# Altium footprint library NFC_Luggage_Tag.PcbLib: 17 footprints (part 1 of 2)
Each footprint in its own frame and in the unit in brackets; x right, y up, seen from the top. Pads: shape width x height; smd on the part's side, far side on the other; paste and mask are expansions set on the pad; w line width, h text height; cw(c..) or ccw(c..) is an arc to the next point about the centre after c.
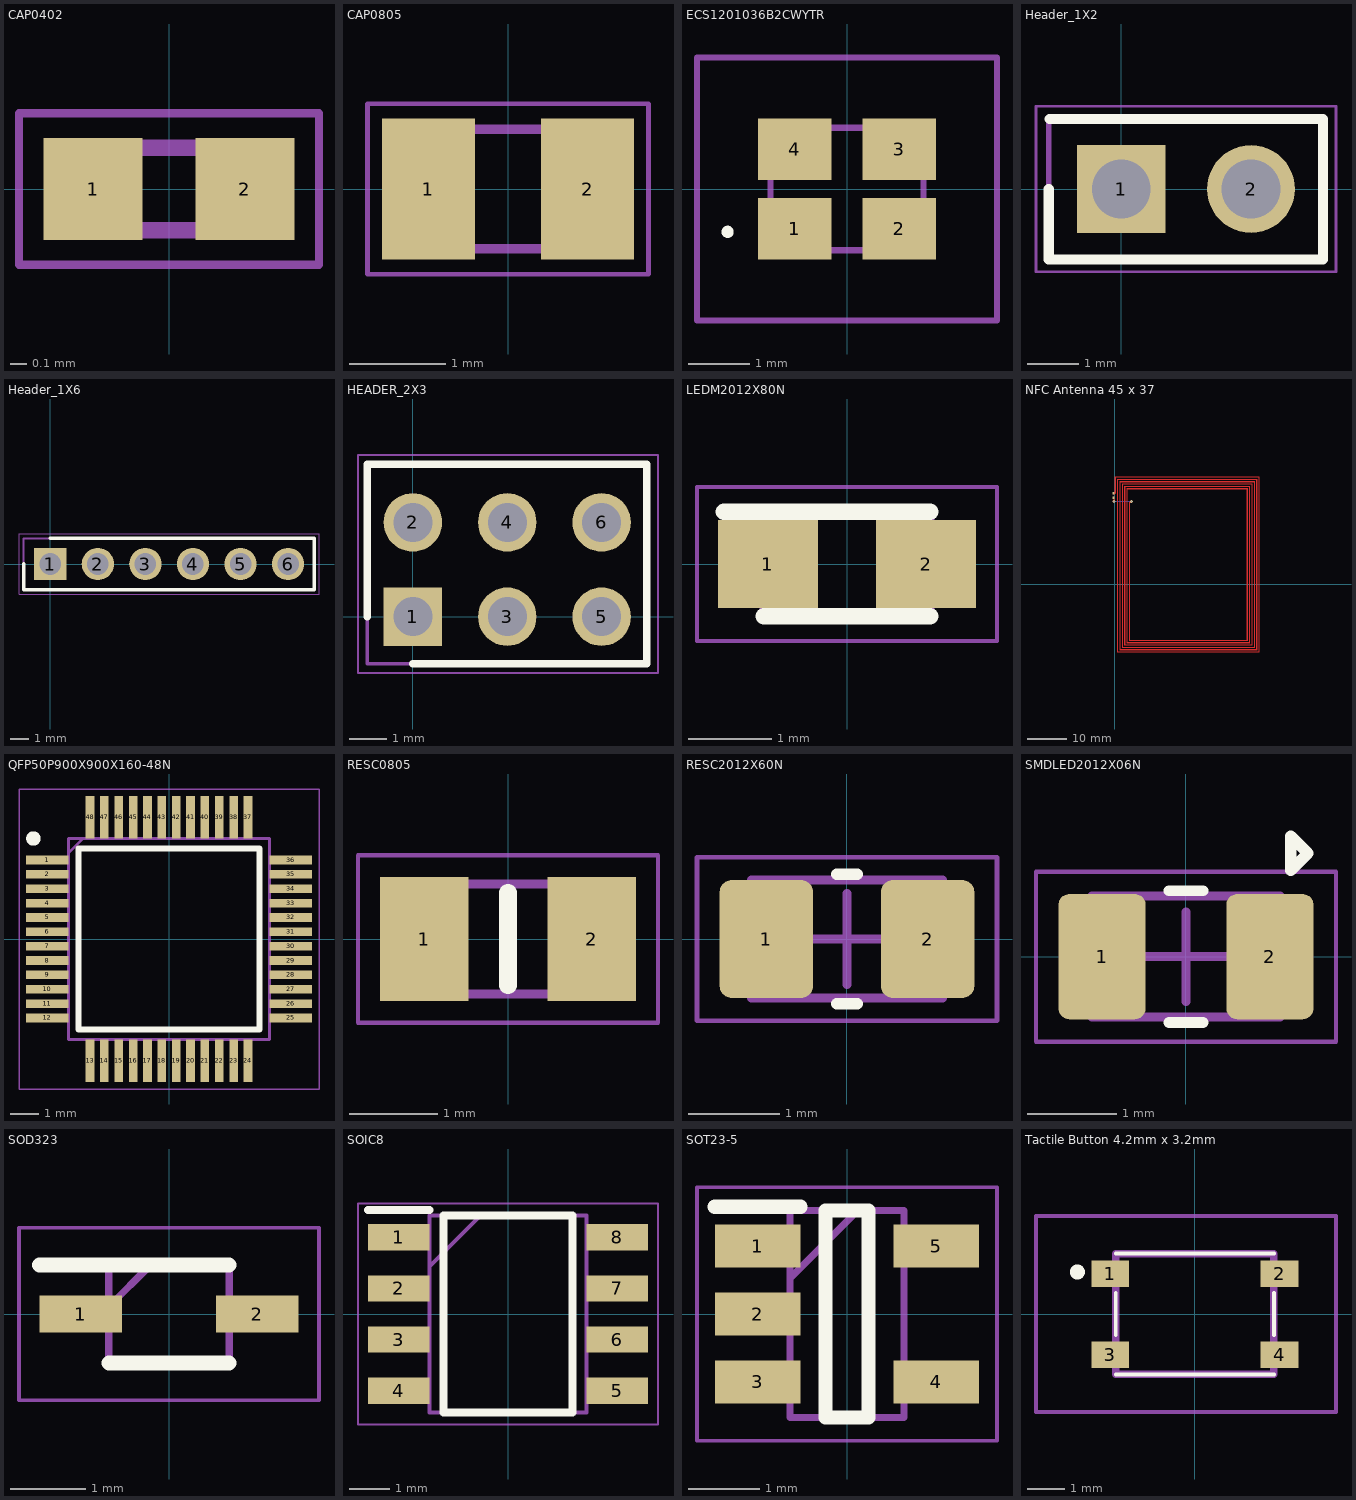
[diagram p0: the footprints below, top view; thin cyan lines are the x and y axes]

## CAP0402 [mm]
pads (2):
  rect 0.6x0.62 smd: 1(-0.46,0) 2(0.46,0)
Mechanical 13:
  lines w0.1: -0.5,-0.25 -0.5,0.25 0.5,0.25 0.5,-0.25 -0.5,-0.25
Mechanical 15:
  lines w0.05: -0.91,-0.46 -0.91,0.46 0.91,0.46 0.91,-0.46 -0.91,-0.46
3D body "GRM1555C1H151JA01D.stp": height 0.55, standoff 0, extent -0.5,-0.25 0.5,0.25

## CAP0805 [mm]
pads (2):
  rect 0.97x1.47 smd: 1(-0.83,0) 2(0.83,0)
Mechanical 13:
  lines w0.1: -1,-0.625 1,-0.625 1,0.625 -1,0.625 -1,-0.625
Mechanical 15:
  lines w0.05: -1.465,-0.89 1.465,-0.89 1.465,0.89 -1.465,0.89 -1.465,-0.89
3D body "GRM21BC60J226ME15K.stp": height 1.45, standoff 0, extent -1,-0.625 1,0.625

## ECS1201036B2CWYTR [mm]
pads (4):
  rect 1.2x1 smd: 1(-0.85,-0.65) 2(0.85,-0.65) 3(0.85,0.65) 4(-0.85,0.65)
Top Overlay:
  lines w0.1: -2,-0.7 ccw(c-1.95,-0.7) -1.9,-0.7 ccw(c-1.95,-0.7) -2,-0.7
Mechanical 13:
  lines w0.1: -1.25,-1 -1.25,1 1.25,1 1.25,-1 -1.25,-1
Mechanical 15:
  lines w0.1: -2.45,-2.15 -2.45,2.15 2.45,2.15 2.45,-2.15 -2.45,-2.15
3D body "ECS-120-10-36B2-CWY-TR.stp": height 0.7, standoff 0, extent -1.35,-1.05 1.35,1.05

## Header_1X2 [mm]
pads (2):
  rect 1.725x1.725 hole 1.15: 1(0,0)
  round 1.725 hole 1.15: 2(2.54,0)
Top Overlay:
  lines w0.2: -1.42,-1.38 3.95,-1.38 ; -1.42,-1.37 -1.42,0 ; -1.4,1.37 3.95,1.37 3.95,-1.35
Mechanical 13:
  lines w0.1: -1.42,-1.37 -1.42,1.37 3.95,1.37 3.95,-1.37
Mechanical 15:
  lines w0.05: 4.2,-1.62 -1.67,-1.62 -1.67,1.62 4.2,1.62 ; 4.204,-1.62 4.204,1.62

## Header_1X6 [mm]
pads (6):
  rect 1.725x1.725 hole 1.15: 1(0,0)
  round 1.725 hole 1.15: 2(2.54,0) 3(5.08,0) 4(7.62,0) 5(10.16,0) 6(12.7,0)
Top Overlay:
  lines w0.2: -1.42,0 -1.42,-1.37 14.097,-1.37 14.097,1.37 0,1.37
Mechanical 13:
  lines w0.1: 9.04,-1.37 -1.42,-1.37 -1.42,1.37 9.04,1.37 ; 14.12,-1.37 14.12,1.37
Mechanical 15:
  lines w0.05: -1.67,-1.62 14.351,-1.62 14.351,1.62 -1.67,1.62 -1.67,-1.62

## HEADER_2X3 [mm]
pads (6):
  rect 1.575x1.575 hole 1.05: 1(0,0)
  round 1.575 hole 1.05: 2(0,2.54) 3(2.54,0) 4(2.54,2.54) 5(5.08,0) 6(5.08,2.54)
Top Overlay:
  lines w0.2: -1.23,0 -1.23,4.11 6.3,4.11 6.3,-1.27 0,-1.27
Mechanical 13:
  lines w0.1: -1.23,-1.27 -1.23,4.11 6.3,4.11 6.3,-1.27 -1.23,-1.27
Mechanical 15:
  lines w0.05: -1.48,-1.52 -1.48,4.36 6.6,4.36 6.6,-1.52 -1.48,-1.52

## LEDM2012X80N [mm]
pads (2):
  rect 1.2x1.05 smd: 1(-0.95,0) 2(0.95,0)
Top Overlay:
  lines w0.2: -1.475,0.625 1,0.625 ; -1,-0.625 1,-0.625
Mechanical 13:
  lines w0.1: -1,0.1 -0.475,0.625 ; -1,-0.625 -1,0.625 1,0.625 1,-0.625 -1,-0.625
Mechanical 15:
  lines w0.05: -1.8,-0.925 -1.8,0.925 1.8,0.925 1.8,-0.925 -1.8,-0.925
3D body "150080GS75000.stp": height 0.7, standoff 0, extent -1,-0.625 1,0.625

## NFC Antenna 45 x 37 [mm]
pads (2):
  rect 0.6x0.6 smd paste-2539.97 mask-2539.97: 1(-0.3,22.1) 2(-0.3,23.2)
via -0.2,21.1 diameter 0.7 hole 0.35
via 4.3,21.1 diameter 0.7 hole 0.35
Top Layer:
  rectangle: 36.7,-17.5 37,27.5
  rectangle: 0.6,-17.5 0.9,26.9
  rectangle: 1.2,-16.9 1.5,26.3
  region: 35.8,26.3 35.5,26.3 35.5,-16.3 35.8,-16.3
  rectangle: 36.1,-16.9 36.4,26.9
  rectangle: -0.3,21.1 0,22.4
  region: 1.8,25.7 1.8,25.4 35.2,25.4 35.2,25.7
  region: 35.2,25.7 34.9,25.7 34.9,-15.7 35.2,-15.7
  rectangle: 1.8,-16.3 2.1,25.7
  region: 2.4,25.1 2.4,24.8 34.6,24.8 34.6,25.1
  region: 34.6,25.1 34.3,25.1 34.3,-15.1 34.6,-15.1
  rectangle: 2.4,-15.7 2.7,25.1
  region: 3,24.5 3,24.2 34,24.2 34,24.5
  region: 34,24.5 33.7,24.5 33.7,-14.5 34,-14.5
  rectangle: 3,-15.1 3.3,24.5
  rectangle: 3.6,-14.5 3.9,21.1
  rectangle: 0,23.2 0.3,27.5
  rectangle: 0.6,26.6 36.4,26.9
  region: 1.2,26.3 1.2,26 35.8,26 35.8,26.3
  rectangle: 0,27.2 37,27.5
  region: 34,-14.5 34,-14.2 3.6,-14.2 3.6,-14.5
  region: 34.6,-15.1 34.6,-14.8 3,-14.8 3,-15.1
  region: 35.2,-15.7 35.2,-15.4 2.4,-15.4 2.4,-15.7
  region: 35.8,-16.3 35.8,-16 1.8,-16 1.8,-16.3
  rectangle: 0.6,-17.5 37,-17.2
  rectangle: 1.2,-16.9 36.4,-16.6
  rectangle: 3.6,20.8 4.1,21.1
  region: 0.3,23.2 0,22.9 -0.3,22.9 -0.3,23.5 0.3,23.5
  region: 4.1,21.3 3.9,21.1 3.9,20.8 4.3,20.8 4.3,21.3
  region: -0.5,21.3 -0.3,21.5 0,21.5 0,21.1 -0.5,21.1
Bottom Layer:
  rectangle: -0.4,20.95 4.5,21.25

## QFP50P900X900X160-48N [mm]
pads (48):
  rect 1.475x0.3 smd: 1(-4.238,2.75) 2(-4.238,2.25) 3(-4.238,1.75) 4(-4.238,1.25) 5(-4.238,0.75) 6(-4.238,0.25) 7(-4.238,-0.25) 8(-4.238,-0.75) 9(-4.238,-1.25) 10(-4.238,-1.75) 11(-4.238,-2.25) 12(-4.238,-2.75) 25(4.238,-2.75) 26(4.238,-2.25) 27(4.238,-1.75) 28(4.238,-1.25) 29(4.238,-0.75) 30(4.238,-0.25) 31(4.238,0.25) 32(4.238,0.75) 33(4.238,1.25) 34(4.238,1.75) 35(4.238,2.25) 36(4.238,2.75)
  rect 0.3x1.475 smd: 13(-2.75,-4.238) 14(-2.25,-4.238) 15(-1.75,-4.238) 16(-1.25,-4.238) 17(-0.75,-4.238) 18(-0.25,-4.238) 19(0.25,-4.238) 20(0.75,-4.238) 21(1.25,-4.238) 22(1.75,-4.238) 23(2.25,-4.238) 24(2.75,-4.238) 37(2.75,4.238) 38(2.25,4.238) 39(1.75,4.238) 40(1.25,4.238) 41(0.75,4.238) 42(0.25,4.238) 43(-0.25,4.238) 44(-0.75,4.238) 45(-1.25,4.238) 46(-1.75,4.238) 47(-2.25,4.238) 48(-2.75,4.238)
Top Overlay:
  circle w0.25: c-4.725,3.5 r0.125
  lines w0.2: -3.15,-3.15 -3.15,3.15 3.15,3.15 3.15,-3.15 -3.15,-3.15
Mechanical 13:
  lines w0.1: -3.5,3 -3,3.5 ; -3.5,-3.5 -3.5,3.5 3.5,3.5 3.5,-3.5 -3.5,-3.5
Mechanical 15:
  lines w0.05: -5.225,-5.225 -5.225,5.225 5.225,5.225 5.225,-5.225 -5.225,-5.225
3D body "STM32L052C8T6.stp": height 1.6, standoff 0, extent -4.5,-4.5 4.5,4.5

## RESC0805 [mm]
pads (2):
  rect 1x1.4 smd: 1(-0.95,0) 2(0.95,0)
Top Overlay:
  lines w0.2: 0,-0.525 0,0.525
Mechanical 13:
  lines w0.1: -1,-0.625 -1,0.625 1,0.625 1,-0.625 -1,-0.625
Mechanical 15:
  lines w0.05: -1.7,-0.95 -1.7,0.95 1.7,0.95 1.7,-0.95 -1.7,-0.95
3D body "CR0805-FX-1781ELF.stp": height 0.5, standoff 0, extent -1,-0.625 1,0.625

## RESC2012X60N [mm] "Chip Resistor, 2-Leads, Body 2.00x1.20mm, IPC Medium Density"
height 0.6
pads (2):
  rrect25% 1.025x1.3 smd: 1(-0.887,0) 2(0.888,0)
Top Overlay:
  lines w0.127: -0.111,-0.713 0.112,-0.713 ; -0.111,0.714 0.112,0.714
Mechanical 13:
  lines w0.1: -1.05,-0.65 1.05,-0.65 1.05,0.65 -1.05,0.65 -1.05,-0.65
Mechanical 15:
  lines w0.05: -1.65,-0.9 1.65,-0.9 1.65,0.9 -1.65,0.9 -1.65,-0.9
  lines w0.1: -0.5,0 0.5,0 ; 0,-0.5 0,0.5
3D body: height 0.6, standoff 0, extent 0.5,-0.65 1.05,0.65
3D body: height 0.6, standoff 0, extent -1.05,-0.65 -0.5,0.65
3D body: height 0.6, standoff 0, extent -0.5,-0.65 0.5,0.65

## SMDLED2012X06N [mm] "Chip Diode, 2-Leads, Body 2.00x1.25mm, IPC Medium Density"
height 0.6
pads (2):
  rrect25% 0.975x1.4 smd: 1(-0.937,0) 2(0.938,0)
Top Overlay:
  lines w0.12: -0.19,-0.735 0.19,-0.735 ; -0.19,0.735 0.19,0.735
  lines w0.127: 1.172,0.964 1.362,1.154 1.172,1.343 1.172,0.964
Mechanical 13:
  rectangle: 0.768,-0.675 1.05,0.675
  lines w0.1: -1.05,-0.675 1.05,-0.675 1.05,0.675 -1.05,0.675 -1.05,-0.675
Mechanical 15:
  lines w0.05: -1.675,-0.95 1.675,-0.95 1.675,0.95 -1.675,0.95 -1.675,-0.95
  lines w0.1: -0.5,0 0.5,0 ; 0,-0.5 0,0.5
3D body: height 0.6, standoff 0, extent 0.65,-0.675 1.05,0.675
3D body: height 0.6, standoff 0, extent -1.05,-0.675 -0.65,0.675
3D body: height 0.6, standoff 0, extent -0.65,-0.675 0.65,0.675

## SOD323 [mm]
pads (2):
  rect 1.1x0.5 smd: 1(-1.175,0) 2(1.175,0)
Top Overlay:
  lines w0.2: -1.725,0.65 0.8,0.65 ; -0.8,-0.65 0.8,-0.65
Mechanical 13:
  lines w0.1: -0.8,0.1 -0.25,0.65 ; -0.8,-0.65 -0.8,0.65 0.8,0.65 0.8,-0.65 -0.8,-0.65
Mechanical 15:
  lines w0.05: -2,-1.15 -2,1.15 2,1.15 2,-1.15 -2,-1.15
3D body "1N4007WS.stp": height 1.1, standoff 0, extent -1.325,-0.65 1.325,0.65

## SOIC8 [mm]
pads (8):
  rect 1.525x0.65 smd: 1(-2.712,1.905) 2(-2.712,0.635) 3(-2.712,-0.635) 4(-2.712,-1.905) 5(2.712,-1.905) 6(2.712,-0.635) 7(2.712,0.635) 8(2.712,1.905)
Top Overlay:
  lines w0.2: -3.475,2.58 -1.95,2.58 ; -1.6,-2.45 -1.6,2.45 1.6,2.45 1.6,-2.45 -1.6,-2.45
Mechanical 13:
  lines w0.1: -1.95,1.18 -0.68,2.45 ; -1.95,-2.45 -1.95,2.45 1.95,2.45 1.95,-2.45 -1.95,-2.45
Mechanical 15:
  lines w0.05: -3.725,-2.75 -3.725,2.75 3.725,2.75 3.725,-2.75 -3.725,-2.75
3D body "NE555DR.stp": height 1.75, standoff 0, extent -3,-2.45 3,2.45

## SOT23-5 [mm]
pads (5):
  rect 1.2x0.6 smd: 1(-1.25,0.95) 2(-1.25,0) 3(-1.25,-0.95) 4(1.25,-0.95) 5(1.25,0.95)
Top Overlay:
  lines w0.2: -1.85,1.5 -0.65,1.5 ; -0.3,-1.45 0.3,-1.45 0.3,1.45 -0.3,1.45 -0.3,-1.45
Mechanical 13:
  lines w0.1: -0.8,0.5 0.15,1.45 ; -0.8,-1.45 0.8,-1.45 0.8,1.45 -0.8,1.45 -0.8,-1.45
Mechanical 15:
  lines w0.05: -2.1,-1.775 2.1,-1.775 2.1,1.775 -2.1,1.775 -2.1,-1.775
3D body "TL071HIDBVR.stp": height 1.2, standoff 0, extent -1.4,-1.45 1.4,1.45

## Tactile Button 4.2mm x 3.2mm [mm]
pads (4):
  rect 1x0.7 smd: 1(-2.25,1.075) 2(2.25,1.075) 3(-2.25,-1.075) 4(2.25,-1.075)
Top Overlay:
  lines w0.1: -2.1,-1.6 2.1,-1.6 ; -2.1,-0.56 -2.1,0.56 ; -2.1,1.61 2.1,1.61 ; 2.1,-0.56 2.1,0.56
  lines w0.2: -3.22,1.12 ccw(c-3.12,1.12) -3.02,1.12 ccw(c-3.12,1.12) -3.22,1.12
Mechanical 13:
  lines w0.2: -2.1,-1.6 2.1,-1.6 2.1,1.6 -2.1,1.6 -2.1,-1.6
Mechanical 15:
  lines w0.1: -4.22,-2.6 3.75,-2.6 3.75,2.61 -4.22,2.61 -4.22,-2.6
3D body "PTS815_SJM_250_SMTR_LFS.stp": height 2.6, standoff 0, extent -2.3,-1.6 2.3,1.6